# Altium footprint library FootPrintLib_10.PcbLib: 270 footprints (part 14 of 17)
Each footprint in its own frame and in the unit in brackets; x right, y up, seen from the top. Pads: shape width x height; smd on the part's side, far side on the other; paste and mask are expansions set on the pad; w line width, h text height; cw(c..) or ccw(c..) is an arc to the next point about the centre after c.
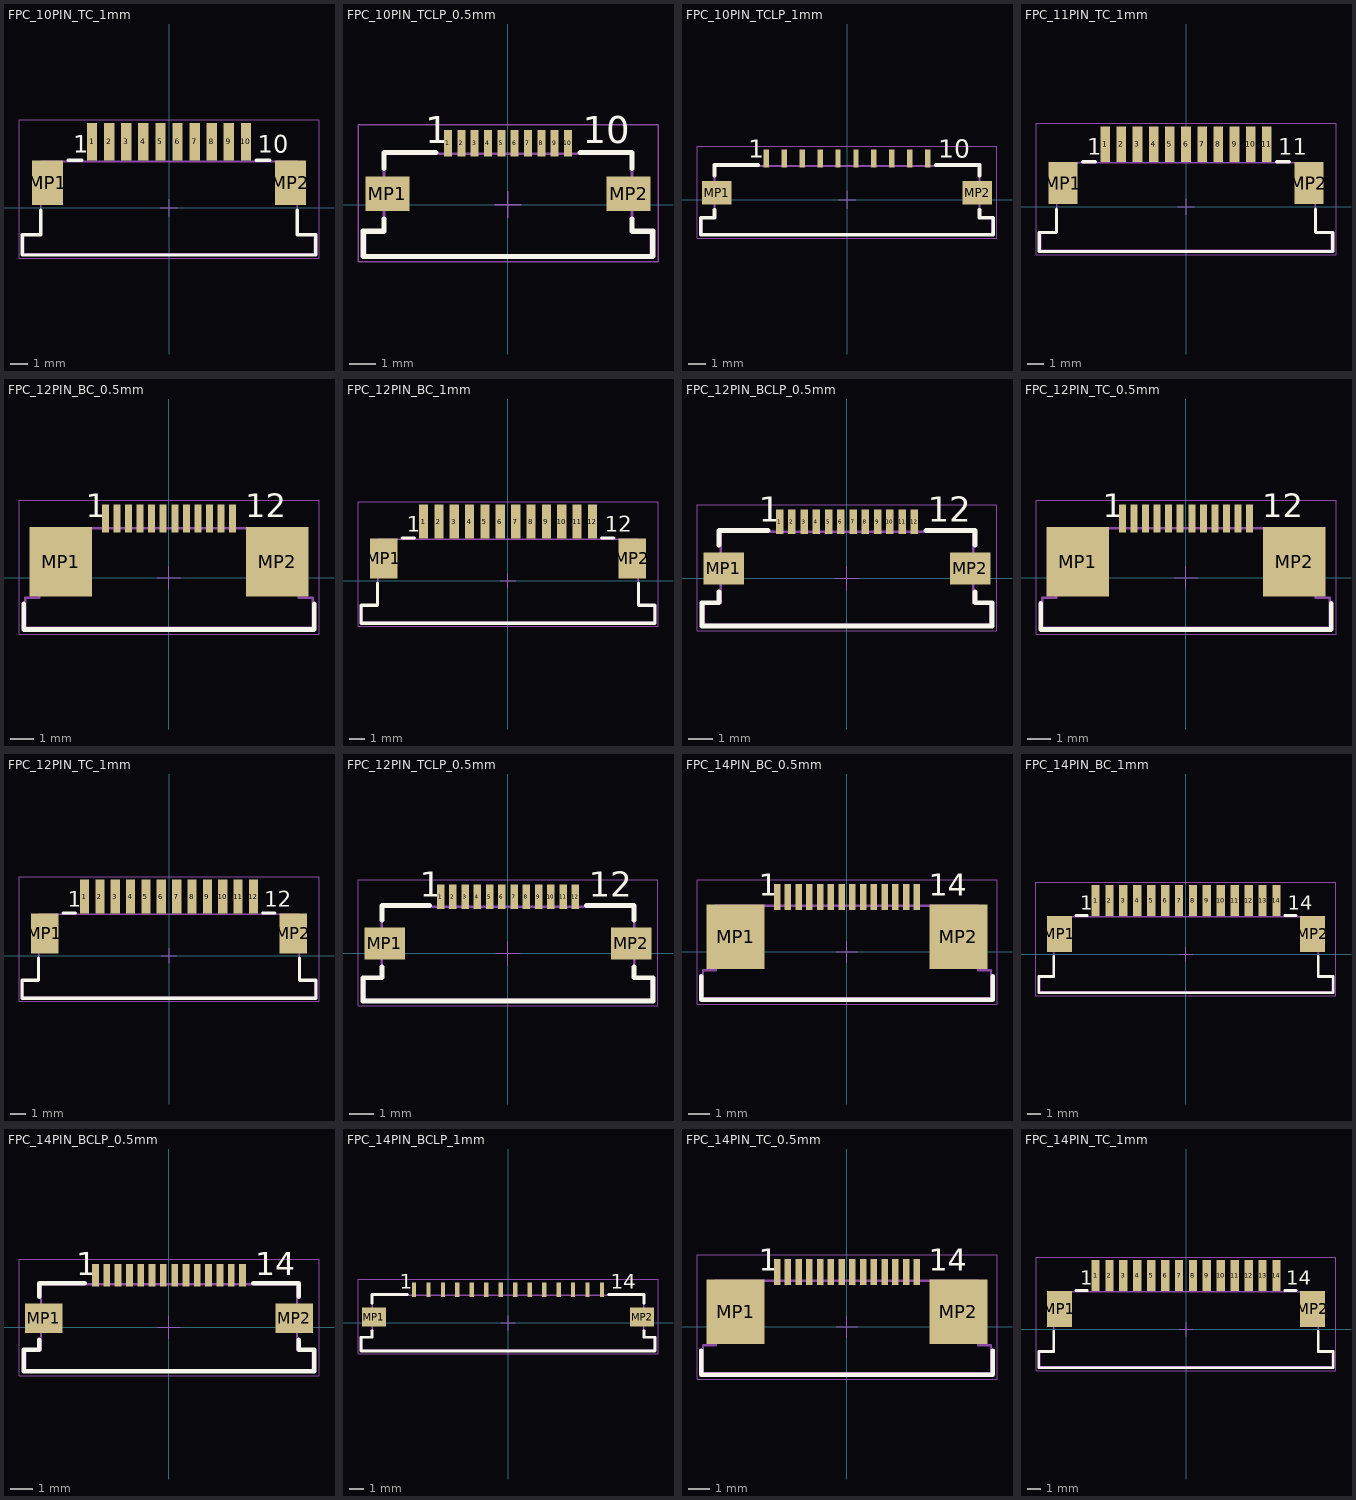
[diagram p13: the footprints below, top view; thin cyan lines are the x and y axes]

## FPC_10PIN_TC_1mm [mm] "ZIF Connectors, Horizontal, Top Contact, pitch 1mm, 10p"
height 3.15
pads (12):
  rect 0.6x2.2 smd: 1(-4.5,3.85) 2(-3.5,3.85) 3(-2.5,3.85) 4(-1.5,3.85) 5(-0.5,3.85) 6(0.5,3.85) 7(1.5,3.85) 8(2.5,3.85) 9(3.5,3.85) 10(4.5,3.85)
  rect 1.8x2.6 smd: MP1(-7.1,1.45) MP2(7.1,1.45)
Top Overlay:
  lines w0.2: -7.5,-0.15 -7.5,-1.6 -8.575,-1.6 -8.575,-2.775 8.575,-2.775 8.575,-1.6 7.5,-1.6 7.5,-0.15 ; -5.9,2.775 -5.1,2.775 ; 5.1,2.775 5.9,2.775
  text "1" at -5.6,3.2 h1.02
  text "10" at 5.2,3.2 h1.02
Mechanical 13:
  lines w0.1: -8.5,-2.7 8.5,-2.7 8.5,-1.6 7.5,-1.6 7.5,2.7 -7.5,2.7 -7.5,-1.6 -8.5,-1.6 -8.5,-2.7
Mechanical 15:
  lines w0.05: -0.5,0 0.5,0 ; 0,-0.5 0,0.5 ; -8.775,-2.975 -8.775,5.15 8.775,5.15 8.775,-2.975 -8.775,-2.975
3D body "68611014122.stp": height 3.02, standoff 0.02, extent -8.5,-2.7 8.5,4.4

## FPC_10PIN_TCLP_0.5mm [mm] "ZIF Connectors, Horizontal, Top Contact Low Profile, pitch 0.5mm, 10p"
height 1.3
pads (12):
  rect 0.3x1 smd: 1(-2.25,2.3) 2(-1.75,2.3) 3(-1.25,2.3) 4(-0.75,2.3) 5(-0.25,2.3) 6(0.25,2.3) 7(0.75,2.3) 8(1.25,2.3) 9(1.75,2.3) 10(2.25,2.3)
  rect 1.65x1.3 smd: MP1(-4.525,0.4) MP2(4.525,0.4)
Top Overlay:
  lines w0.2: -4.65,-0.55 -4.65,-1 -5.425,-1 -5.425,-1.95 5.425,-1.95 5.425,-1 4.65,-1 4.65,-0.55 ; -4.65,1.35 -4.65,1.95 -2.7,1.95 ; 2.7,1.95 4.65,1.95 4.65,1.35
  text "1" at -3.1,2.3 h1.02
  text "10" at 2.8,2.3 h1.02
Mechanical 13:
  lines w0.1: -5.35,-1.9 -5.35,-1 -4.65,-1 -4.65,1.9 4.65,1.9 4.65,-1 5.35,-1 5.35,-1.9 -5.35,-1.9
Mechanical 15:
  lines w0.05: -0.5,0 0.5,0 ; 0,-0.5 0,0.5 ; -5.625,-2.15 -5.625,3 5.625,3 5.625,-2.15 -5.625,-2.15
3D body "687110183622.stp": height 1.28, standoff -0.01, extent -5.35,-1.9 5.35,2.35

## FPC_10PIN_TCLP_1mm [mm] "ZIF Connectors, Horizontal, Top Contact Low Profile, pitch 1mm, 10p"
height 1.3
pads (12):
  rect 0.3x1 smd: 1(-4.5,2.3) 2(-3.5,2.3) 3(-2.5,2.3) 4(-1.5,2.3) 5(-0.5,2.3) 6(0.5,2.3) 7(1.5,2.3) 8(2.5,2.3) 9(3.5,2.3) 10(4.5,2.3)
  rect 1.65x1.3 smd: MP1(-7.275,0.4) MP2(7.275,0.4)
Top Overlay:
  lines w0.2: -7.4,-0.55 -7.4,-1 -8.175,-1 -8.175,-1.95 8.175,-1.95 8.175,-1 7.4,-1 7.4,-0.55 ; -7.4,1.35 -7.4,1.95 -4.95,1.95 ; 4.95,1.95 7.4,1.95 7.4,1.35
  text "10" at 5.1,2.35 h1.02
  text "1" at -5.5,2.35 h1.02
Mechanical 13:
  lines w0.1: -8.1,-1 -8.1,-1.9 8.1,-1.9 8.1,-1 7.4,-1 7.4,1.9 -7.4,1.9 -7.4,-1 -8.1,-1 ; -8.1,-1 -8.1,-1
Mechanical 15:
  lines w0.05: -0.5,0 0.5,0 ; 0,-0.5 0,0.5 ; -8.375,-2.15 -8.375,3 8.375,3 8.375,-2.15 -8.375,-2.15
3D body "686110183422.stp": height 1.28, standoff -0.01, extent -8.1,-1.9 8.1,2.35

## FPC_11PIN_TC_1mm [mm] "ZIF Connectors, Horizontal, Top Contact, pitch 1mm, 11p"
height 3.15
pads (13):
  rect 0.6x2.2 smd: 1(-5,3.85) 2(-4,3.85) 3(-3,3.85) 4(-2,3.85) 5(-1,3.85) 6(0,3.85) 7(1,3.85) 8(2,3.85) 9(3,3.85) 10(4,3.85) 11(5,3.85)
  rect 1.8x2.6 smd: MP1(-7.6,1.45) MP2(7.6,1.45)
Top Overlay:
  lines w0.2: -8,-0.15 -8,-1.6 -9.075,-1.6 -9.075,-2.775 9.075,-2.775 9.075,-1.6 8,-1.6 8,-0.15 ; -6.4,2.775 -5.6,2.775 ; 5.6,2.775 6.4,2.775
  text "11" at 5.7,3.2 h1.02
  text "1" at -6.1,3.2 h1.02
Mechanical 13:
  lines w0.1: -9,-2.7 9,-2.7 9,-1.6 8,-1.6 8,2.7 -8,2.7 -8,-1.6 -9,-1.6 -9,-2.7
Mechanical 15:
  lines w0.05: -0.5,0 0.5,0 ; 0,-0.5 0,0.5 ; -9.275,-2.975 -9.275,5.15 9.275,5.15 9.275,-2.975 -9.275,-2.975
3D body "68611114122.stp": height 3.02, standoff 0.02, extent -9,-2.7 9,4.4

## FPC_12PIN_BC_0.5mm [mm] "ZIF Connectors, Horizontal, Bottom Contact, pitch 0.5mm, 12p"
height 2.25
pads (14):
  rect 0.3x1.2 smd: 1(-2.75,2.56) 2(-2.25,2.56) 3(-1.75,2.56) 4(-1.25,2.56) 5(-0.75,2.56) 6(-0.25,2.56) 7(0.25,2.56) 8(0.75,2.56) 9(1.25,2.56) 10(1.75,2.56) 11(2.25,2.56) 12(2.75,2.56)
  rect 2.7x3 smd: MP1(-4.68,0.7) MP2(4.68,0.7)
Top Overlay:
  lines w0.2: -6.275,-1.125 -6.275,-2.225 6.275,-2.225 6.275,-1.125
  text "12" at 3.3,2.61 h1.02
  text "1" at -3.6,2.61 h1.02
Mechanical 13:
  lines w0.1: -6.2,-2.15 6.2,-2.15 6.2,-0.85 5.6,-0.85 5.6,2.15 -5.6,2.15 -5.6,-0.85 -6.2,-0.85 -6.2,-2.15
Mechanical 15:
  lines w0.05: -0.5,0 0.5,0 ; 0,-0.5 0,0.5 ; -6.475,-2.425 -6.475,3.36 6.475,3.36 6.475,-2.425 -6.475,-2.425
3D body "68711214522.stp": height 2.1, standoff 0, extent -6.2,-2.15 6.2,2.95

## FPC_12PIN_BC_1mm [mm] "ZIF Connectors, Horizontal, Bottom Contact, pitch 1mm, 12p"
height 3.15
pads (14):
  rect 0.6x2.2 smd: 1(-5.5,3.85) 2(-4.5,3.85) 3(-3.5,3.85) 4(-2.5,3.85) 5(-1.5,3.85) 6(-0.5,3.85) 7(0.5,3.85) 8(1.5,3.85) 9(2.5,3.85) 10(3.5,3.85) 11(4.5,3.85) 12(5.5,3.85)
  rect 1.8x2.6 smd: MP1(-8.1,1.45) MP2(8.1,1.45)
Top Overlay:
  lines w0.2: -8.5,-0.15 -8.5,-1.6 -9.575,-1.6 -9.575,-2.775 9.575,-2.775 9.575,-1.6 8.5,-1.6 8.5,-0.15 ; -6.9,2.775 -6.1,2.775 ; 6.1,2.775 6.9,2.775
  text "1" at -6.6,3.2 h1.02
  text "12" at 6.3,3.2 h1.02
Mechanical 13:
  lines w0.1: -9.5,-2.7 -9.5,-1.6 -8.5,-1.6 -8.5,2.7 8.5,2.7 8.5,-1.6 9.5,-1.6 9.5,-2.7 -9.5,-2.7
Mechanical 15:
  lines w0.05: -0.5,0 0.5,0 ; 0,-0.5 0,0.5 ; -9.775,-2.975 -9.775,5.15 9.775,5.15 9.775,-2.975 -9.775,-2.975
3D body "68611214422.stp": height 3.02, standoff 0.01, extent -9.5,-2.7 9.5,4.4

## FPC_12PIN_BCLP_0.5mm [mm] "ZIF Connectors, Horizontal, Bottom Contact Low Profile, pitch 0.5mm, 12p"
height 1.3
pads (14):
  rect 0.3x1 smd: 1(-2.75,2.3) 2(-2.25,2.3) 3(-1.75,2.3) 4(-1.25,2.3) 5(-0.75,2.3) 6(-0.25,2.3) 7(0.25,2.3) 8(0.75,2.3) 9(1.25,2.3) 10(1.75,2.3) 11(2.25,2.3) 12(2.75,2.3)
  rect 1.65x1.3 smd: MP1(-5.025,0.4) MP2(5.025,0.4)
Top Overlay:
  lines w0.2: -5.225,-0.55 -5.225,-1 -5.925,-1 -5.925,-1.95 5.925,-1.95 5.925,-1 5.225,-1 5.225,-0.55 ; -5.225,1.35 -5.225,1.95 -3.225,1.95 ; 3.225,1.95 5.225,1.95 5.225,1.35
  text "12" at 3.3,2.3 h1.02
  text "1" at -3.6,2.3 h1.02
Mechanical 13:
  lines w0.1: -5.85,-1.9 5.85,-1.9 5.85,-1 5.15,-1 5.15,1.9 -5.15,1.9 -5.15,-1 -5.85,-1 -5.85,-1.9
Mechanical 15:
  lines w0.05: -0.5,0 0.5,0 ; 0,-0.5 0,0.5 ; -6.125,-2.15 6.125,-2.15 6.125,3 -6.125,3 -6.125,-2.15
3D body "687112183722.stp": height 1.28, standoff -0.01, extent -5.85,-1.9 5.85,2.35

## FPC_12PIN_TC_0.5mm [mm] "ZIF Connectors, Horizontal, Top Contact, pitch 0.5mm, 12p"
height 2.25
pads (14):
  rect 0.3x1.2 smd: 1(-2.75,2.56) 2(-2.25,2.56) 3(-1.75,2.56) 4(-1.25,2.56) 5(-0.75,2.56) 6(-0.25,2.56) 7(0.25,2.56) 8(0.75,2.56) 9(1.25,2.56) 10(1.75,2.56) 11(2.25,2.56) 12(2.75,2.56)
  rect 2.7x3 smd: MP1(-4.68,0.7) MP2(4.68,0.7)
Top Overlay:
  lines w0.2: -6.275,-1.1 -6.275,-2.225 6.275,-2.225 6.275,-1.1
  text "1" at -3.6,2.61 h1.02
  text "12" at 3.3,2.61 h1.02
Mechanical 13:
  lines w0.1: -6.2,-2.15 -6.2,-0.85 -5.6,-0.85 -5.6,2.15 5.6,2.15 5.6,-0.85 6.2,-0.85 6.2,-2.15 -6.2,-2.15
Mechanical 15:
  lines w0.05: -0.5,0 0.5,0 ; 0,-0.5 0,0.5 ; -6.475,-2.425 -6.475,3.36 6.475,3.36 6.475,-2.425 -6.475,-2.425
3D body "68711214022.stp": height 2.1, standoff 0, extent -6.2,-2.15 6.2,2.95

## FPC_12PIN_TC_1mm [mm] "ZIF Connectors, Horizontal, Top Contact, pitch 1mm, 12p"
height 3.15
pads (14):
  rect 0.6x2.2 smd: 1(-5.5,3.85) 2(-4.5,3.85) 3(-3.5,3.85) 4(-2.5,3.85) 5(-1.5,3.85) 6(-0.5,3.85) 7(0.5,3.85) 8(1.5,3.85) 9(2.5,3.85) 10(3.5,3.85) 11(4.5,3.85) 12(5.5,3.85)
  rect 1.8x2.6 smd: MP1(-8.1,1.45) MP2(8.1,1.45)
Top Overlay:
  lines w0.2: -8.5,-0.15 -8.5,-1.6 -9.575,-1.6 -9.575,-2.775 9.575,-2.775 9.575,-1.6 8.5,-1.6 8.5,-0.15 ; -6.9,2.775 -6.1,2.775 ; 6.1,2.775 6.9,2.775
  text "1" at -6.6,3.2 h1.02
  text "12" at 6.2,3.2 h1.02
Mechanical 13:
  lines w0.1: -9.5,-2.7 -9.5,-1.6 -8.5,-1.6 -8.5,2.7 8.5,2.7 8.5,-1.6 9.5,-1.6 9.5,-2.7 -9.5,-2.7
Mechanical 15:
  lines w0.05: -0.5,0 0.5,0 ; 0,-0.5 0,0.5 ; -9.775,-2.975 9.775,-2.975 9.775,5.15 -9.775,5.15 -9.775,-2.975
3D body "68611214122.stp": height 3.02, standoff 0.02, extent -9.5,-2.7 9.5,4.4

## FPC_12PIN_TCLP_0.5mm [mm] "ZIF Connectors, Horizontal, Top Contact Low Profile, pitch 0.5mm, 12p"
height 1.3
pads (14):
  rect 0.3x1 smd: 1(-2.75,2.3) 2(-2.25,2.3) 3(-1.75,2.3) 4(-1.25,2.3) 5(-0.75,2.3) 6(-0.25,2.3) 7(0.25,2.3) 8(0.75,2.3) 9(1.25,2.3) 10(1.75,2.3) 11(2.25,2.3) 12(2.75,2.3)
  rect 1.65x1.3 smd: MP1(-5.025,0.4) MP2(5.025,0.4)
Top Overlay:
  lines w0.2: -5.15,-0.55 -5.15,-1 -5.925,-1 -5.925,-1.95 5.925,-1.95 5.925,-1 5.15,-1 5.15,-0.55 ; -5.15,1.35 -5.15,1.95 -3.2,1.95 ; 3.2,1.95 5.15,1.95 5.15,1.35
  text "12" at 3.3,2.3 h1.02
  text "1" at -3.6,2.3 h1.02
Mechanical 13:
  lines w0.1: -5.85,-1.9 5.85,-1.9 5.85,-1 5.15,-1 5.15,1.9 -5.15,1.9 -5.15,-1 -5.85,-1 -5.85,-1.9
Mechanical 15:
  lines w0.05: -0.5,0 0.5,0 ; 0,-0.5 0,0.5 ; -6.125,-2.15 6.125,-2.15 6.125,3 -6.125,3 -6.125,-2.15
3D body "687112183622.stp": height 1.28, standoff -0.01, extent -5.85,-1.9 5.85,2.35

## FPC_14PIN_BC_0.5mm [mm] "ZIF Connectors, Horizontal, Bottom Contact, pitch 0.5mm, 14p"
height 2.25
pads (16):
  rect 0.3x1.2 smd: 1(-3.25,2.56) 2(-2.75,2.56) 3(-2.25,2.56) 4(-1.75,2.56) 5(-1.25,2.56) 6(-0.75,2.56) 7(-0.25,2.56) 8(0.25,2.56) 9(0.75,2.56) 10(1.25,2.56) 11(1.75,2.56) 12(2.25,2.56) 13(2.75,2.56) 14(3.25,2.56)
  rect 2.7x3 smd: MP1(-5.18,0.7) MP2(5.18,0.7)
Top Overlay:
  lines w0.2: -6.775,-1.125 -6.775,-2.225 6.775,-2.225 6.775,-1.125
  text "1" at -4.1,2.61 h1.02
  text "14" at 3.8,2.61 h1.02
Mechanical 13:
  lines w0.1: -6.7,-2.15 -6.7,-0.85 -6.1,-0.85 -6.1,2.15 6.1,2.15 6.1,-0.85 6.7,-0.85 6.7,-2.15 -6.7,-2.15
Mechanical 15:
  lines w0.05: -0.5,0 0.5,0 ; 0,-0.5 0,0.5 ; -6.975,-2.425 6.975,-2.425 6.975,3.36 -6.975,3.36 -6.975,-2.425
3D body "68711414522.stp": height 2.1, standoff 0, extent -6.7,-2.15 6.7,2.95

## FPC_14PIN_BC_1mm [mm] "ZIF Connectors, Horizontal, Bottom Contact, pitch 1mm, 14p"
height 3.15
pads (16):
  rect 0.6x2.2 smd: 1(-6.5,3.85) 2(-5.5,3.85) 3(-4.5,3.85) 4(-3.5,3.85) 5(-2.5,3.85) 6(-1.5,3.85) 7(-0.5,3.85) 8(0.5,3.85) 9(1.5,3.85) 10(2.5,3.85) 11(3.5,3.85) 12(4.5,3.85) 13(5.5,3.85) 14(6.5,3.85)
  rect 1.8x2.6 smd: MP1(-9.1,1.45) MP2(9.1,1.45)
Top Overlay:
  lines w0.2: -9.5,-0.15 -9.5,-1.6 -10.575,-1.6 -10.575,-2.775 10.575,-2.775 10.575,-1.6 9.5,-1.6 9.5,-0.15 ; -7.9,2.775 -7.1,2.775 ; 7.1,2.775 7.9,2.775
  text "1" at -7.6,3.2 h1.02
  text "14" at 7.3,3.2 h1.02
Mechanical 13:
  lines w0.1: -10.5,-2.7 10.5,-2.7 10.5,-1.6 9.5,-1.6 9.5,2.7 -9.5,2.7 -9.5,-1.6 -10.5,-1.6 -10.5,-2.7
Mechanical 15:
  lines w0.05: -0.5,0 0.5,0 ; 0,-0.5 0,0.5 ; -10.775,-2.975 10.775,-2.975 10.775,5.15 -10.775,5.15 -10.775,-2.975
3D body "68611414422.stp": height 3.02, standoff 0.01, extent -10.5,-2.7 10.5,4.4

## FPC_14PIN_BCLP_0.5mm [mm] "ZIF Connectors, Horizontal, Bottom Contact Low Profile, pitch 0.5mm, 14p"
height 1.3
pads (16):
  rect 0.3x1 smd: 1(-3.25,2.3) 2(-2.75,2.3) 3(-2.25,2.3) 4(-1.75,2.3) 5(-1.25,2.3) 6(-0.75,2.3) 7(-0.25,2.3) 8(0.25,2.3) 9(0.75,2.3) 10(1.25,2.3) 11(1.75,2.3) 12(2.25,2.3) 13(2.75,2.3) 14(3.25,2.3)
  rect 1.65x1.3 smd: MP1(-5.525,0.4) MP2(5.525,0.4)
Top Overlay:
  lines w0.2: -5.725,-0.55 -5.725,-1 -6.425,-1 -6.425,-1.95 6.425,-1.95 6.425,-1 5.725,-1 5.725,-0.55 ; -5.725,1.35 -5.725,1.95 -3.725,1.95 ; 3.725,1.95 5.725,1.95 5.725,1.35
  text "1" at -4.1,2.3 h1.02
  text "14" at 3.8,2.3 h1.02
Mechanical 13:
  lines w0.1: -6.35,-1.9 6.35,-1.9 6.35,-1 5.65,-1 5.65,1.9 -5.65,1.9 -5.65,-1 -6.35,-1 -6.35,-1.9
Mechanical 15:
  lines w0.05: -0.5,0 0.5,0 ; 0,-0.5 0,0.5 ; -6.625,-2.15 6.625,-2.15 6.625,3 -6.625,3 -6.625,-2.15
3D body "687114183722.stp": height 1.28, standoff -0.01, extent -6.35,-1.9 6.35,2.35

## FPC_14PIN_BCLP_1mm [mm] "ZIF Connectors, Horizontal, Bottom Contact Low Profile, pitch 1mm, 14p"
height 1.3
pads (16):
  rect 0.3x1 smd: 1(-6.5,2.3) 2(-5.5,2.3) 3(-4.5,2.3) 4(-3.5,2.3) 5(-2.5,2.3) 6(-1.5,2.3) 7(-0.5,2.3) 8(0.5,2.3) 9(1.5,2.3) 10(2.5,2.3) 11(3.5,2.3) 12(4.5,2.3) 13(5.5,2.3) 14(6.5,2.3)
  rect 1.65x1.3 smd: MP1(-9.275,0.4) MP2(9.275,0.4)
Top Overlay:
  lines w0.2: -9.4,-0.55 -9.4,-1 -10.175,-1 -10.175,-1.95 10.175,-1.95 10.175,-1 9.4,-1 9.4,-0.55 ; -9.4,1.35 -9.4,1.95 -6.95,1.95 ; 6.95,1.95 9.4,1.95 9.4,1.35
  text "1" at -7.5,2.35 h1.02
  text "14" at 7.1,2.35 h1.02
Mechanical 13:
  lines w0.1: -10.1,-1 -9.4,-1 -9.4,1.9 9.4,1.9 9.4,-1 10.1,-1 10.1,-1.9 -10.1,-1.9 -10.1,-1 ; -10.1,-1 -10.1,-1
Mechanical 15:
  lines w0.05: -0.5,0 0.5,0 ; 0,-0.5 0,0.5 ; -10.375,-2.15 10.375,-2.15 10.375,3 -10.375,3 -10.375,-2.15
3D body "686114183522.stp": height 1.24, standoff -0.01, extent -10.1,-1.9 10.1,2.35

## FPC_14PIN_TC_0.5mm [mm] "ZIF Connectors, Horizontal, Top Contact, pitch 0.5mm, 14p"
height 2.25
pads (16):
  rect 0.3x1.2 smd: 1(-3.25,2.56) 2(-2.75,2.56) 3(-2.25,2.56) 4(-1.75,2.56) 5(-1.25,2.56) 6(-0.75,2.56) 7(-0.25,2.56) 8(0.25,2.56) 9(0.75,2.56) 10(1.25,2.56) 11(1.75,2.56) 12(2.25,2.56) 13(2.75,2.56) 14(3.25,2.56)
  rect 2.7x3 smd: MP1(-5.18,0.7) MP2(5.18,0.7)
Top Overlay:
  lines w0.2: -6.775,-1.1 -6.775,-2.225 6.775,-2.225 6.775,-1.1
  text "1" at -4.1,2.61 h1.02
  text "14" at 3.8,2.61 h1.02
Mechanical 13:
  lines w0.1: -6.7,-2.15 6.7,-2.15 6.7,-0.85 6.1,-0.85 6.1,2.15 -6.1,2.15 -6.1,-0.85 -6.7,-0.85 -6.7,-2.15
Mechanical 15:
  lines w0.05: -0.5,0 0.5,0 ; 0,-0.5 0,0.5 ; -6.975,-2.425 6.975,-2.425 6.975,3.36 -6.975,3.36 -6.975,-2.425
3D body "68711414022.stp": height 2.1, standoff 0, extent -6.7,-2.15 6.7,2.95

## FPC_14PIN_TC_1mm [mm] "ZIF Connectors, Horizontal, Top Contact, pitch 1mm, 14p"
height 3.15
pads (16):
  rect 0.6x2.2 smd: 1(-6.5,3.85) 2(-5.5,3.85) 3(-4.5,3.85) 4(-3.5,3.85) 5(-2.5,3.85) 6(-1.5,3.85) 7(-0.5,3.85) 8(0.5,3.85) 9(1.5,3.85) 10(2.5,3.85) 11(3.5,3.85) 12(4.5,3.85) 13(5.5,3.85) 14(6.5,3.85)
  rect 1.8x2.6 smd: MP1(-9.1,1.45) MP2(9.1,1.45)
Top Overlay:
  lines w0.2: -9.5,-0.15 -9.5,-1.6 -10.575,-1.6 -10.575,-2.775 10.575,-2.775 10.575,-1.6 9.5,-1.6 9.5,-0.15 ; -7.9,2.775 -7.1,2.775 ; 7.1,2.775 7.9,2.775
  text "14" at 7.2,3.2 h1.02
  text "1" at -7.6,3.2 h1.02
Mechanical 13:
  lines w0.1: -10.5,-2.7 -10.5,-1.6 -9.5,-1.6 -9.5,2.7 9.5,2.7 9.5,-1.6 10.5,-1.6 10.5,-2.7 -10.5,-2.7
Mechanical 15:
  lines w0.05: -0.5,0 0.5,0 ; 0,-0.5 0,0.5 ; -10.775,-2.975 10.775,-2.975 10.775,5.15 -10.775,5.15 -10.775,-2.975
3D body "68611414122.stp": height 3.02, standoff 0.02, extent -10.5,-2.7 10.5,4.4